# Altium schematic symbol library Components - 31.10.26 - 18.00.SchLib: 1 symbol
Pins are listed as number, name and electrical type; pins without a type are passive.

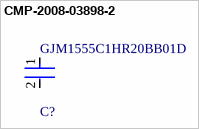
[diagram p0: symbol CMP-2008-03898-2]

## CMP-2008-03898-2
designator C?, comment GJM1555C1HR20BB01D
Multi-Layer Ceramic Capacitor 0.2pF C0G  ±0.1pF 0402 Paper T/R; Voltage Rating (DC): 50V; Packaging: Tape and Reel; REACH SVHC: No SVHC; Mount: Surface Mount; Thickness: 0.022inch; Height: 0.5mm; Package Quantity: 1; Depth: 0.5mm; Max Operating Temperature: 125°C; Case Code (Imperial): 0402; Number of Pins: 2; Termination: SMD/SMT; Min Operating Temperature: -55°C; Lead Pitch: 0.3mm; Width: 0.5mm; Radiation Hardening: No; Length: 1mm; Voltage Rating: 50V; Dielectric: C0G; Case/Package: 0402; Capacitance: 0.2pF; Lead Free: Lead Free; Case Code (Metric): 1005
footprint FP-GJM155-0_05-IPC_C
footprint FP-GJM155-0_05-IPC_A
footprint FP-GJM155-0_05-IPC_B
footprint FP-GJM155-0_05-MFG
pins: 1, 2